# Altium footprint library PcbLib_Source_IoT.PcbLib: 49 footprints (part 4 of 4)
Each footprint in its own frame and in the unit in brackets; x right, y up, seen from the top. Pads: shape width x height; smd on the part's side, far side on the other; paste and mask are expansions set on the pad; w line width, h text height; cw(c..) or ccw(c..) is an arc to the next point about the centre after c.
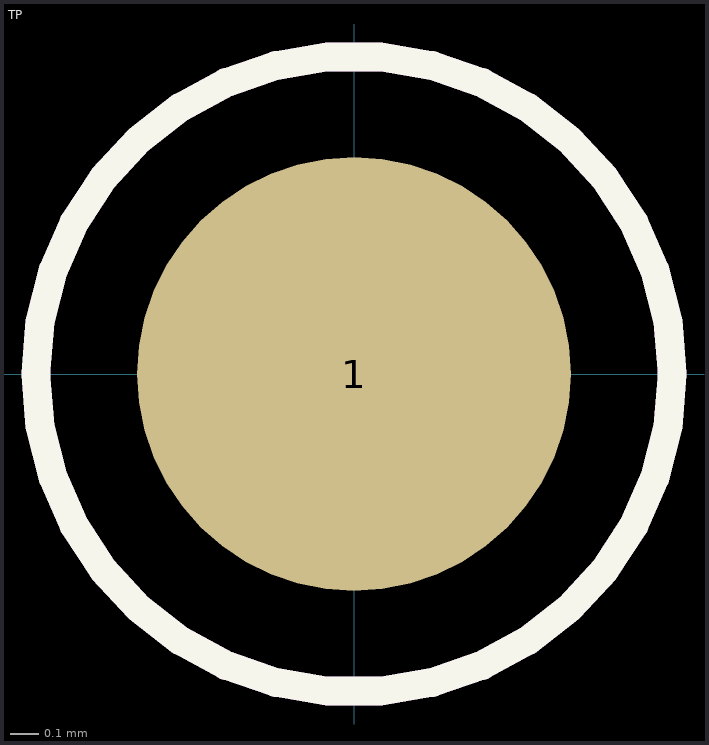
[diagram p3: the footprint, top view; thin cyan lines are the x and y axes]

## TP [mm]
pads (1):
  round 1.5 smd mask+0.2: 1(0,0)
Top Overlay:
  circle w0.1: c0,0 r1.1
Mechanical:
  circle w0.1: c0,0 r1.1
  lines w0.1: -0.375,0 0.375,0 ; 0,-0.375 0,0.375
Bottom Assembly (Mech30):
  circle w0.1: c0,0 r0.65